# Altium footprint library Other.PcbLib: 67 footprints (part 4 of 5)
Each footprint in its own frame and in the unit in brackets; x right, y up, seen from the top. Pads: shape width x height; smd on the part's side, far side on the other; paste and mask are expansions set on the pad; w line width, h text height; cw(c..) or ccw(c..) is an arc to the next point about the centre after c.
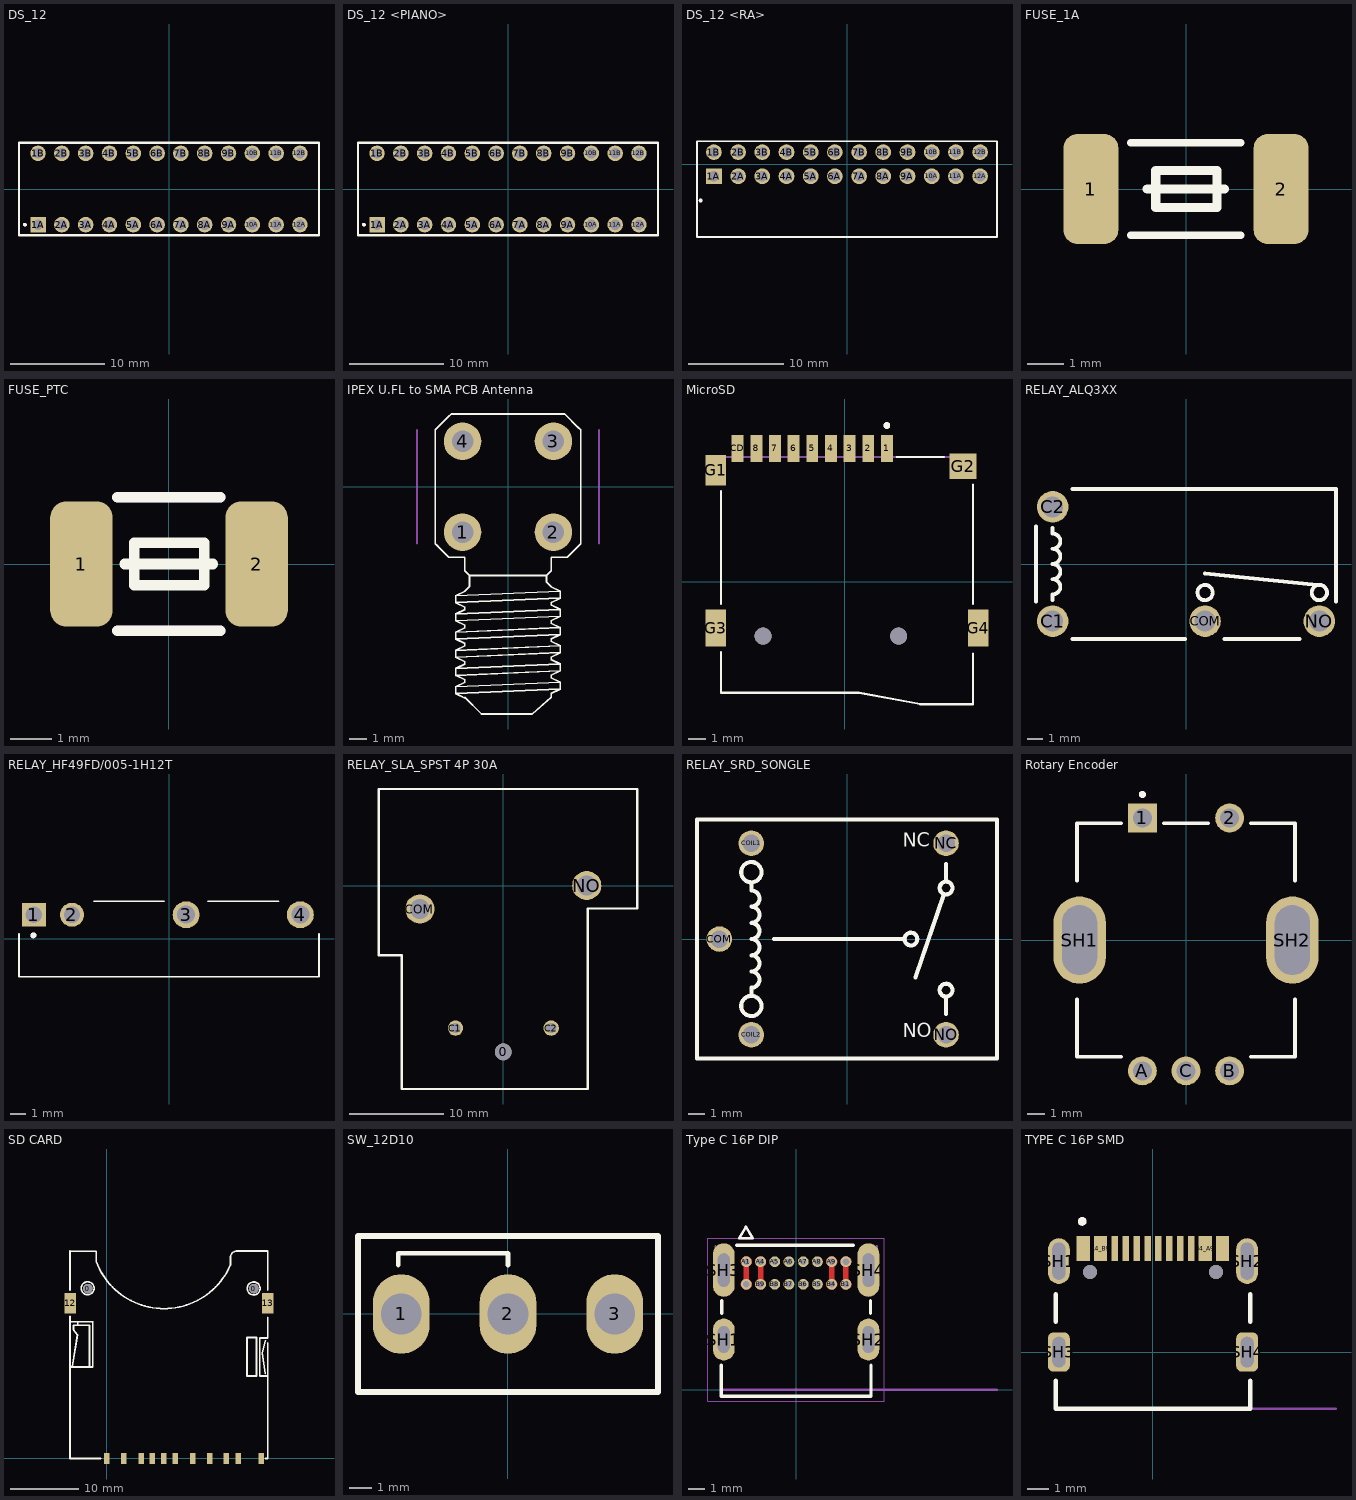
[diagram p3: the footprints below, top view; thin cyan lines are the x and y axes]

## DS_12 [mm]
height 7
pads (24):
  rect 1.65x1.65 hole 1.1: 1A(-13.97,-3.81)
  round 1.65 hole 1.1: 1B(-13.97,3.81) 2A(-11.43,-3.81) 2B(-11.43,3.81) 3A(-8.89,-3.81) 3B(-8.89,3.81) 4A(-6.35,-3.81) 4B(-6.35,3.81) 5A(-3.81,-3.81) 5B(-3.81,3.81) 6A(-1.27,-3.81) 6B(-1.27,3.81) 7A(1.27,-3.81) 7B(1.27,3.81) 8A(3.81,-3.81) 8B(3.81,3.81) 9A(6.35,-3.81) 9B(6.35,3.81) 10A(8.89,-3.81) 10B(8.89,3.81) 11A(11.43,-3.81) 11B(11.43,3.81) 12A(13.97,-3.81) 12B(13.97,3.81)
Top Overlay:
  circle w0.2: c-15.367,-3.81 r0.1
  lines w0.254: -16.002,-4.953 16.002,-4.953 16.002,4.953 -16.002,4.953 -16.002,-4.953
Mechanical 13:
  circle w0.2: c-15.367,-3.81 r0.1
3D body "DS1040-12 (DIP_switch).stp": height 6.93, standoff -3.72, extent -15.97,-4.95 15.97,4.95

## DS_12 <PIANO> [mm]
height 7
pads (24):
  rect 1.65x1.65 hole 1.1: 1A(-13.97,-3.81)
  round 1.65 hole 1.1: 1B(-13.97,3.81) 2A(-11.43,-3.81) 2B(-11.43,3.81) 3A(-8.89,-3.81) 3B(-8.89,3.81) 4A(-6.35,-3.81) 4B(-6.35,3.81) 5A(-3.81,-3.81) 5B(-3.81,3.81) 6A(-1.27,-3.81) 6B(-1.27,3.81) 7A(1.27,-3.81) 7B(1.27,3.81) 8A(3.81,-3.81) 8B(3.81,3.81) 9A(6.35,-3.81) 9B(6.35,3.81) 10A(8.89,-3.81) 10B(8.89,3.81) 11A(11.43,-3.81) 11B(11.43,3.81) 12A(13.97,-3.81) 12B(13.97,3.81)
Top Overlay:
  circle w0.2: c-15.367,-3.81 r0.1
  lines w0.254: -16.002,-4.953 -16.002,4.953 16.002,4.953 16.002,-4.953 -16.002,-4.953
Mechanical 13:
  circle w0.2: c-15.367,-3.81 r0.1
3D body "DS1040-12RT.STEP": height 8.8, standoff -3.85, extent -15.97,-6.45 15.97,4.95

## DS_12 <RA> [mm]
height 7
pads (24):
  rect 1.65x1.65 hole 1.1: 1A(-13.97,-1.27)
  round 1.65 hole 1.1: 1B(-13.97,1.27) 2A(-11.43,-1.27) 2B(-11.43,1.27) 3A(-8.89,-1.27) 3B(-8.89,1.27) 4A(-6.35,-1.27) 4B(-6.35,1.27) 5A(-3.81,-1.27) 5B(-3.81,1.27) 6A(-1.27,-1.27) 6B(-1.27,1.27) 7A(1.27,-1.27) 7B(1.27,1.27) 8A(3.81,-1.27) 8B(3.81,1.27) 9A(6.35,-1.27) 9B(6.35,1.27) 10A(8.89,-1.27) 10B(8.89,1.27) 11A(11.43,-1.27) 11B(11.43,1.27) 12A(13.97,-1.27) 12B(13.97,1.27)
Top Overlay:
  circle w0.2: c-15.367,-3.81 r0.1
  lines w0.2: -15.748,-7.62 -15.748,2.413 15.748,2.413 15.748,-7.62
  lines w0.203: -15.748,-7.62 15.748,-7.62
Mechanical 13:
  circle w0.2: c-15.367,-3.81 r0.1
3D body "DA12R.STEP": height 10.03, standoff -4.27, extent -15.74,-8.87 15.74,1.345

## FUSE_1A [mm]
pads (2):
  rrect50% 1.5x3 smd: 1(-2.6,0) 2(2.6,0)
Top Overlay:
  lines w0.203: -1.504,-1.27 -0.004,-1.27 1.496,-1.27 ; -1.504,1.27 -0.004,1.27 1.496,1.27
  lines w0.254: -1.059,0 1.05,0 ; -0.83,0.508 -0.83,-0.508 0.846,-0.508 0.846,0.508 -0.805,0.508
3D body "1808-2410 ?????.STEP": height 2.58, standoff 0.04, extent -3.054,-1.27 3.046,1.27

## FUSE_PTC [mm]
pads (2):
  rrect50% 1.5x3 smd: 1(-2.1,0) 2(2.1,0)
Top Overlay:
  lines w0.254: -1.236,-1.6 1.227,-1.6 ; -1.236,1.6 1.227,1.6 ; -1.059,0 1.05,0 ; -0.83,0.508 -0.83,-0.508 0.846,-0.508 0.846,0.508 -0.805,0.508
Mechanical 2:
  lines w0.254: -1.232,-1.6 1.232,-1.6 ; -1.232,1.6 1.232,1.6
  text "'.Designator'" at -4.445,2.245 h1.8
3D body "User Library-0ZCG-0_90mmPTC1812X0_5MM.STEP": height 0.55, standoff 0.05, extent -2.254,-1.6 2.246,1.6

## IPEX U.FL to SMA PCB Antenna [mm]
pads (4):
  round 2.1 hole 1.2: 1(-2.54,-2.54) 2(2.54,-2.54) 3(2.54,2.54) 4(-2.54,2.54)
Top Overlay:
  lines w0.102: -3.937,-3.302 -4.064,-3.175 ; -2.413,-11.811 -2.921,-11.557 ; -2.413,-11.769 -1.482,-12.7 1.355,-12.7 2.413,-11.769 2.413,-11.557 2.921,-11.303 ; 4.064,1.905 4.064,3.175 3.937,3.302 3.175,4.064 -3.175,4.064 -3.302,3.937 -4.064,3.175 -4.064,-3.175 ; 4.064,2.032 4.064,-3.175 3.302,-3.937 2.413,-3.937 2.413,-4.699 2.159,-4.953 ; -4.064,-3.175 -3.302,-3.937 -2.413,-3.937 -2.413,-4.699 -2.159,-4.953 ; -2.921,-11.557 -2.921,-11.176 ; -2.921,-11.557 2.921,-11.303 ; -2.921,-11.176 -2.413,-10.922 -2.413,-10.795 -2.921,-10.541 ; -2.921,-11.176 2.921,-10.922 ; -2.921,-10.541 -2.921,-10.16 ; -2.921,-10.541 2.921,-10.287 ; -2.921,-10.16 -2.413,-9.906 -2.413,-9.779 -2.921,-9.525 ; -2.921,-10.16 2.921,-9.906 ; -2.921,-9.525 -2.921,-9.144 ; -2.921,-9.525 2.921,-9.271 ; -2.921,-9.144 -2.413,-8.89 -2.413,-8.763 -2.921,-8.509 ; -2.921,-9.144 2.921,-8.89 ; -2.921,-8.509 -2.921,-8.128 ; -2.921,-8.509 2.921,-8.255 ; -2.921,-8.128 -2.413,-7.874 -2.413,-7.747 -2.921,-7.493 ; -2.921,-8.128 2.921,-7.874 ; -2.921,-7.493 -2.921,-7.112 ; -2.921,-7.493 2.921,-7.239 ; -2.921,-7.112 -2.413,-6.858 -2.413,-6.731 -2.921,-6.477 ; -2.921,-7.112 2.921,-6.858 ; -2.921,-6.477 -2.921,-6.096 ; -2.921,-6.477 2.921,-6.223 ; -2.921,-6.096 -2.413,-5.842 -2.159,-5.588 -2.159,-5.334 -2.159,-5.08 -2.159,-4.953 ; -2.921,-6.096 2.921,-5.842 ; -2.159,-4.953 2.159,-4.953 ; 2.159,-4.953 2.159,-5.08 2.159,-5.334 2.413,-5.588 2.921,-5.842 ; 2.921,-11.303 2.921,-10.922 ; 2.921,-10.922 2.413,-10.668 2.413,-10.541 2.921,-10.287 ; 2.921,-10.287 2.921,-9.906 ; 2.921,-9.906 2.413,-9.652 2.413,-9.525 2.921,-9.271 ; 2.921,-9.271 2.921,-8.89 ; 2.921,-8.89 2.413,-8.636 2.413,-8.509 2.921,-8.255 ; 2.921,-8.255 2.921,-7.874 ; 2.921,-7.874 2.413,-7.62 2.413,-7.493 2.921,-7.239 ; 2.921,-7.239 2.921,-6.858 ; 2.921,-6.858 2.413,-6.604 2.413,-6.477 2.921,-6.223 ; 2.921,-6.223 2.921,-5.842
Mechanical 1:
  lines w0.102: -5.08,-3.175 -5.08,3.175 ; 5.08,-3.175 5.08,3.175
3D body "SMA-J-P-X-RA-TH1.step": height 10.39, standoff -3.41, extent -3.467,-11.62 3.533,3.48

## MicroSD [mm]
pads (15):
  rect 0.7x1.6 smd: 1(2.477,7.877) 2(1.377,7.877) 3(0.277,7.877) 4(-0.823,7.877) 5(-1.923,7.877) 6(-3.023,7.877) 7(-4.123,7.877) 8(-5.223,7.877) CD(-6.323,7.877)
  rect 1.2x1.8 smd: G1(-7.623,6.577)
  rect 1.6x1.5 smd: G2(6.977,6.827)
  rect 1.2x2.2 smd: G3(-7.623,-2.723) G4(7.877,-2.723)
  round 1 hole 1 unplated: ""(-4.823,-3.2) ""(3.177,-3.2)
Top Overlay:
  circle w0.2: c2.477,9.227 r0.1
  lines w0.127: -7.298,-4.137 -7.298,-6.542 0.838,-6.542 4.445,-7.214 7.552,-7.214 7.552,-4.214 ; -7.298,-1.303 -7.298,5.357 ; 3.047,7.377 5.857,7.377 ; 7.552,-1.303 7.552,5.757
Mechanical 13:
  circle w0.2: c2.477,9.227 r0.1
  lines w0.127: -7.298,7.377 7.552,7.377
3D body "step_temp.STEP": height 1.93, standoff -0.47, extent -7.92,-7.2 8.23,7.85

## RELAY_ALQ3XX [mm]
pads (4):
  round 2.1 hole 1.4: C1(-8.89,-3.81) C2(-8.89,3.81) COM(1.27,-3.81) NO(8.89,-3.81)
Top Overlay:
  circle w0.254: c1.27,-1.905 r0.508
  circle w0.254: c8.89,-1.905 r0.508
  lines w0.254: -10,-2.5 -10,2.5 ; -8.89,-2.413 -8.89,-2.032 ccw(c-8.89,-1.524) -8.382,-1.524 ccw(c-8.89,-1.524) -8.89,-1.016 ccw(c-8.89,-0.508) -8.382,-0.508 ccw(c-8.89,-0.508) -8.89,0 ccw(c-8.89,0.508) -8.382,0.508 ccw(c-8.89,0.508) -8.89,1.016 ccw(c-8.89,1.524) -8.382,1.524 ccw(c-8.89,1.524) -8.89,2.032 -8.89,2.413 ; -7.58,-5 -0.045,-5 ; -7.58,5 10,5 10,-2.5 ; 1.27,-0.635 8.778,-1.397 ; 2.57,-5 7.58,-5
3D body "panasonic_ALQ3XX.STEP": height 15.73, standoff -4.07, extent -10,-5 10,5

## RELAY_HF49FD/005-1H12T [mm]
pads (4):
  rect 1.6x1.6 hole 1.1: 1(-9.03,1.6)
  round 1.6 hole 1.1: 2(-6.49,1.6)
  round 1.8 hole 1.2: 3(1.13,1.6) 4(8.75,1.6)
Top Overlay:
  circle w0.2: c-9.068,0.229 r0.1
  lines w0.127: -10.028,0.33 -10.028,-2.54 10,-2.54 10,0.33 ; -5.03,2.5 -0.33,2.5 ; 2.59,2.5 7.29,2.5
Mechanical 13:
  circle w0.2: c-9.068,0.229 r0.1
3D body "HF49FD_005-1H12.stp": height 12.63, standoff -3.37, extent -10,-2.501 10,2.5

## RELAY_SLA_SPST 4P 30A [mm] "RELAY 5-12-24 VDC"
height 15.8
pads (5):
  round 1.8 hole 1.8 mask+0.102: 0(0,-17.74)
  round 1.65 hole 1.1 mask+0.102: C1(-5.1,-15.2) C2(5.1,-15.2)
  round 3.116 hole 2.1 mask+0.102: COM(-8.9,-2.5) NO(8.9,0)
Top Overlay:
  lines w0.254: -13.3,-7.45 -10.85,-7.45 -10.85,-21.7 9,-21.7 9,-2.45 14.3,-2.45 14.3,10.3 -13.3,10.3 -13.3,-7.45
3D body "step_temp.STEP": height 20.4, standoff -3.2, extent -13.3,-21.7 14.3,10.3

## RELAY_SRD_SONGLE [mm] "RELAY 5-12-24 VDC"
height 15.8
pads (5):
  round 1.6 hole 1.1: COIL1(-6,6) COIL2(-6,-6) COM(-8,0) NC(6.2,6) NO(6.2,-6)
Top Overlay:
  circle w0.254: c6.2,-3.2 r0.4
  circle w0.254: c4,0 r0.4
  circle w0.254: c-6,-4.191 r0.635
  circle w0.254: c-6,4.191 r0.635
  circle w0.254: c6.2,3.2 r0.4
  lines w0.254: -6,-3.556 -6,-3.048 ccw(c-6,-2.54) -5.492,-2.54 ccw(c-6,-2.54) -6,-2.032 ccw(c-6,-1.524) -5.492,-1.524 ccw(c-6,-1.524) -6,-1.016 ccw(c-6,-0.508) -5.492,-0.508 ccw(c-6,-0.508) -6,0 ccw(c-6,0.508) -5.492,0.508 ccw(c-6,0.508) -6,1.016 ccw(c-6,1.524) -5.492,1.524 ccw(c-6,1.524) -6,2.032 ccw(c-6,2.54) -5.492,2.54 ccw(c-6,2.54) -6,3.048 -6,3.556 ; -4.572,0 3.6,0 ; 4.284,-2.401 6.071,2.822 ; 6.2,-4.7 6.2,-3.6 ; 6.2,3.6 6.2,4.7 ; -9.404,-7.489 9.392,-7.489 9.392,7.497 -9.404,7.497 -9.404,-7.489
  text "NO" at 3.5,-6.462 h1.5
  text "NC" at 3.5,5.476 h1.5
3D body "srd-05vdc-sl-c.stp": height 15.43, standoff -4.87, extent -9.4,-7.5 9.4,7.5

## Rotary Encoder [mm]
pads (7):
  rect 1.65x1.65 hole 1.1 mask+0.102: 1(-2.5,7)
  round 1.65 hole 1.1 mask+0.102: 2(2.5,7) A(-2.5,-7.5) B(2.5,-7.5) C(0,-7.5)
  oval 3x5 hole 2 slot 4 at 90 deg mask+0.102: SH1(-6.1,0) SH2(6.1,0)
Top Overlay:
  circle w0.2: c-2.5,8.35 r0.1
  lines w0.203: -6.25,-3.4 -6.25,-6.7 -3.7,-6.7 ; -6.25,3.4 -6.25,6.7 -3.7,6.7 ; -1.272,6.7 1.278,6.7 ; 3.7,-6.7 6.25,-6.7 6.25,-3.4 ; 3.7,6.7 6.25,6.7 6.25,3.4
Mechanical 13:
  circle w0.2: c-2.5,8.35 r0.1
3D body "pec11r-4215k-s0024.stp": height 23.1, standoff -2.1, extent -7,-7.7 7,7.2

## SD CARD [mm]
pads (15):
  round 1.4 hole 1.4: 0(-2.775,24.771) 0(21.425,24.771)
  rect 0.8x1.6 smd: 1(2.475,-0.004) 2(5,-0.004) 3(8.3,-0.004) 4(9.95,-0.004) 5(12.5,-0.004) 6(14.975,-0.004) 7(17.375,-0.004) 8(19.125,-0.004) 9(0,-0.004) 10(6.6,-0.004) 11(22.5,-0.004)
  rect 1.7x3 smd: 12(-5.35,22.621) 13(23.475,22.621)
Top Overlay:
  circle w0.254: c21.412,24.79 r0.943
  circle w0.254: c-2.794,24.816 r0.941
  lines w0.254: -5.359,19.939 -2.083,19.939 -2.057,19.914 -2.057,13.335 -5.334,13.335 ; -5.359,24.536 -5.359,30.251 -5.334,30.226 -1.549,30.226 -1.549,28.753 ; -5.334,20.701 ccw(c-5.334,20.676) -5.359,20.676 -5.359,0 -0.914,0 ; -5.055,13.36 -4.293,18.034 -4.877,18.821 -4.877,19.406 -2.54,19.406 -2.54,13.386 ; -4.242,19.406 -4.242,19.914 ; -1.549,28.727 ccw(c8.337,32.389) 18.014,28.205 ; 17.983,28.219 ccw(c17.983,28.27) 18.034,28.27 18.034,29.337 cw(c18.923,29.337) 18.923,30.226 ; 18.872,30.251 23.47,30.251 23.47,24.562 ; 21.793,12.014 20.447,12.014 20.447,17.653 21.819,17.653 21.819,12.014 ; 23.089,12.37 22.657,15.367 23.114,17.17 ; 23.139,0 23.444,0 23.444,0.66 23.444,11.963 ; 23.393,17.577 22.301,17.577 22.301,12.065 ccw(c22.327,12.065) 22.327,12.04 23.444,12.04 ; 23.444,12.014 23.444,16.84 ; 23.444,17.577 23.444,20.599
3D body "MMC SD Card.STEP": height 2.75, standoff -0.6, extent -5.35,-0.004 23.45,30.296

## SW_12D10 [mm]
pads (3):
  oval 2.5x3.5 hole 1.8: 1(-4.7,0) 2(0,0) 3(4.7,0)
Top Overlay:
  lines w0.203: -4.826,2.159 -4.826,2.667 0,2.667 0,2.159
  lines w0.254: -6.604,-3.429 6.604,-3.429 6.604,3.429 -6.604,3.429 -6.604,-3.429
3D body "SS-12D10L4.STEP": height 10.61, standoff -6.49, extent -6.5,-3.4 6.5,3.4

## Type C 16P DIP [mm]
height 3.36
pads (20):
  round 0.648 hole 0.4 mask+0.064: A1(-2.975,7.65) A4(-2.125,7.65) A5(-1.275,7.65) A6(-0.425,7.65) A7(0.425,7.65) A8(1.275,7.65) A9(2.125,7.65) A12(2.975,7.65) B1(2.975,6.3) B4(2.125,6.3) B5(1.275,6.3) B6(0.425,6.3) B7(-0.425,6.3) B8(-1.275,6.3) B9(-2.125,6.3) B12(-2.975,6.3)
  oval 1.3x2.5 hole 0.7 slot 1.6 at 90 deg mask+0.064: SH1(-4.32,3) SH2(4.32,3)
  oval 1.3x3.2 hole 0.7 slot 2 at 90 deg mask+0.064: SH3(-4.32,7.15) SH4(4.32,7.15)
Top Layer:
  region: 3.032,7.969 3.087,7.954 3.139,7.929 3.186,7.896 3.226,7.855 3.258,7.808 3.281,7.756 3.295,7.7 3.299,7.643 3.293,7.586 3.277,7.531 3.251,7.48 3.217,7.434 3.175,7.395 3.125,7.363 3.125,6.587 3.175,6.555 3.217,6.516 3.251,6.47 3.277,6.419 3.293,6.364 3.299,6.307 3.295,6.25 3.281,6.194 3.258,6.142 3.226,6.095 3.186,6.054 3.139,6.021 3.087,5.996 3.032,5.981 2.975,5.976 2.918,5.981 2.863,5.996 2.811,6.021 2.764,6.054 2.724,6.095 2.692,6.142 2.669,6.194 2.655,6.25 2.651,6.307 2.657,6.364 2.673,6.419 2.699,6.47 2.733,6.516 2.775,6.555 2.825,6.587 2.825,7.363 2.775,7.395 2.733,7.434 2.699,7.48 2.673,7.531 2.657,7.586 2.651,7.643 2.655,7.7 2.669,7.756 2.692,7.808 2.724,7.855 2.764,7.896 2.811,7.929 2.863,7.954 2.918,7.969 2.975,7.974
  region: 2.182,7.969 2.237,7.954 2.289,7.929 2.336,7.896 2.376,7.855 2.408,7.808 2.431,7.756 2.445,7.7 2.449,7.643 2.443,7.586 2.427,7.531 2.401,7.48 2.367,7.434 2.325,7.395 2.275,7.363 2.275,6.587 2.325,6.555 2.367,6.516 2.401,6.47 2.427,6.419 2.443,6.364 2.449,6.307 2.445,6.25 2.431,6.194 2.408,6.142 2.376,6.095 2.336,6.054 2.289,6.021 2.237,5.996 2.182,5.981 2.125,5.976 2.068,5.981 2.013,5.996 1.961,6.021 1.914,6.054 1.874,6.095 1.842,6.142 1.819,6.194 1.805,6.25 1.801,6.307 1.807,6.364 1.823,6.419 1.849,6.47 1.883,6.516 1.925,6.555 1.975,6.587 1.975,7.363 1.925,7.395 1.883,7.434 1.849,7.48 1.823,7.531 1.807,7.586 1.801,7.643 1.805,7.7 1.819,7.756 1.842,7.808 1.874,7.855 1.914,7.896 1.961,7.929 2.013,7.954 2.068,7.969 2.125,7.974
  region: -2.068,7.969 -2.013,7.954 -1.961,7.929 -1.914,7.896 -1.874,7.855 -1.842,7.808 -1.819,7.756 -1.805,7.7 -1.801,7.643 -1.807,7.586 -1.823,7.531 -1.849,7.48 -1.883,7.434 -1.925,7.395 -1.975,7.363 -1.975,6.587 -1.925,6.555 -1.883,6.516 -1.849,6.47 -1.823,6.419 -1.807,6.364 -1.801,6.307 -1.805,6.25 -1.819,6.194 -1.842,6.142 -1.874,6.095 -1.914,6.054 -1.961,6.021 -2.013,5.996 -2.068,5.981 -2.125,5.976 -2.182,5.981 -2.237,5.996 -2.289,6.021 -2.336,6.054 -2.376,6.095 -2.408,6.142 -2.431,6.194 -2.445,6.25 -2.449,6.307 -2.443,6.364 -2.427,6.419 -2.401,6.47 -2.367,6.516 -2.325,6.555 -2.275,6.587 -2.275,7.363 -2.325,7.395 -2.367,7.434 -2.401,7.48 -2.427,7.531 -2.443,7.586 -2.449,7.643 -2.445,7.7 -2.431,7.756 -2.408,7.808 -2.376,7.855 -2.336,7.896 -2.289,7.929 -2.237,7.954 -2.182,7.969 -2.125,7.974
  region: -2.918,7.969 -2.863,7.954 -2.811,7.929 -2.764,7.896 -2.724,7.855 -2.692,7.808 -2.669,7.756 -2.655,7.7 -2.651,7.643 -2.657,7.586 -2.673,7.531 -2.699,7.48 -2.733,7.434 -2.775,7.395 -2.825,7.363 -2.825,6.587 -2.775,6.555 -2.733,6.516 -2.699,6.47 -2.673,6.419 -2.657,6.364 -2.651,6.307 -2.655,6.25 -2.669,6.194 -2.692,6.142 -2.724,6.095 -2.764,6.054 -2.811,6.021 -2.863,5.996 -2.918,5.981 -2.975,5.976 -3.032,5.981 -3.087,5.996 -3.139,6.021 -3.186,6.054 -3.226,6.095 -3.258,6.142 -3.281,6.194 -3.295,6.25 -3.299,6.307 -3.293,6.364 -3.277,6.419 -3.251,6.47 -3.217,6.516 -3.175,6.555 -3.125,6.587 -3.125,7.363 -3.175,7.395 -3.217,7.434 -3.251,7.48 -3.277,7.531 -3.293,7.586 -3.299,7.643 -3.295,7.7 -3.281,7.756 -3.258,7.808 -3.226,7.855 -3.186,7.896 -3.139,7.929 -3.087,7.954 -3.032,7.969 -2.975,7.974
Top Overlay:
  lines w0.15: -3.397,9.05 -2.997,9.75 -2.597,9.05 -3.397,9.05
  lines w0.203: -4.475,1.463 -4.475,-0.4 4.475,-0.4 4.475,1.463 ; -4.445,4.572 -4.445,5.334 ; -3.556,8.636 3.429,8.636 ; 4.445,4.572 4.445,5.334
Top Solder:
  drawing of 4 lines, arcs and shapes, not listed
Mechanical 12:
  text "PTH Slot 2.0 +/- 0.05 X 0.7 +/- 0.05" at -4.878,12.688 h0.5
  text "PTH Slot 1.6 +/- 0.05 X 0.7 +/- 0.05" at -4.878,12.053 h0.5
Mechanical 13:
  lines w0.13: -4.82,8.57 -4.82,6.17 -4.475,6.17 ; 4.475,-0.4 -4.475,-0.4 -4.475,0 12,0 ; 4.475,6.17 4.82,6.17 4.82,8.57 ; -3.397,9.05 -2.997,9.75 -2.597,9.05 -3.397,9.05
  text "PCB Edge" at 5.5,0.25 h1
Mechanical 15:
  lines w0.01: -5.27,-0.7 5.27,-0.7 5.27,9.05 -5.27,9.05 -5.27,-0.7
3D body "2137160001--3DModel-STEP-269445.STEP": height 3.36, standoff -1, extent -4.82,-0.334 4.82,8.636

## TYPE C 16P SMD [mm]
height 3.31
pads (18):
  rect 0.6x1.15 smd: A1_B12(-3.2,4.755) A4_B9(-2.4,4.755) B1_A12(3.2,4.755) B4_A9(2.4,4.755)
  rect 0.3x1.15 smd: A5(-1.25,4.755) A6(-0.25,4.755) A7(0.25,4.755) A8(1.25,4.755) B5(1.75,4.755) B6(0.75,4.755) B7(-0.75,4.755) B8(-1.75,4.755)
  oval 1x2.1 hole 0.6 slot 1.7 at 90 deg: SH1(-4.32,4.18) SH2(4.32,4.18)
  rrect50% 1x1.8 hole 0.6 slot 1.4 at 90 deg: SH3(-4.32,0) SH4(4.32,0)
  round 0.65 hole 0.65 unplated mask+0.102: ""(-2.89,3.68) ""(2.89,3.68)
Top Overlay:
  circle w0.2: c-3.25,6 r0.1
  lines w0.2: -4.47,-2.6 -4.47,-1.32 ; -4.47,1.4 -4.47,2.65 ; 4.47,-2.6 4.47,-1.32 ; 4.47,1.4 4.47,2.65
  lines w0.203: -4.47,-2.6 4.47,-2.6
Mechanical 1:
  lines w0.1: 4.47,-2.6 8.4,-2.6
  text "PCB EDGE" at 5.4,-2.5 h0.41
3D body "step_temp.STEP": height 3.31, standoff -1.2, extent -4.47,-2.6 4.47,5.11